# Altium footprint library USB_A.PcbLib: 1 footprints
Each footprint in its own frame and in the unit in brackets; x right, y up, seen from the top. Pads: shape width x height; smd on the part's side, far side on the other; paste and mask are expansions set on the pad; w line width, h text height; cw(c..) or ccw(c..) is an arc to the next point about the centre after c.
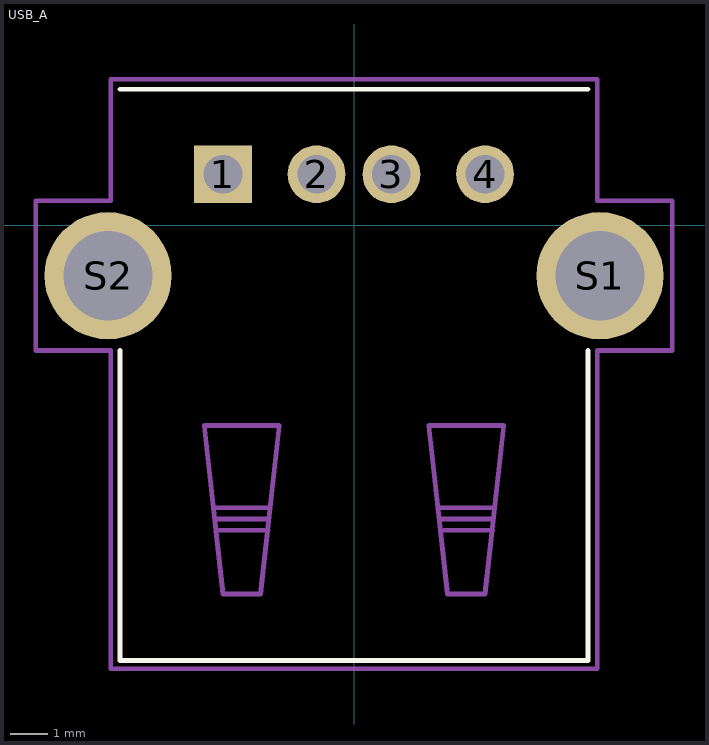
[diagram p0: the footprint, top view; thin cyan lines are the x and y axes]

## USB_A [mm] "MOLEX_67643-0910"
pads (6):
  rect 1.545x1.545 hole 1.03: 1(-3.5,1.355)
  round 1.545 hole 1.03: 2(-1,1.355) 3(1,1.355) 4(3.5,1.355)
  round 3.396 hole 2.38: S1(6.57,-1.355) S2(-6.57,-1.355)
Top Overlay:
  lines w0.127: -6.25,-3.355 -6.25,-11.635 6.25,-11.635 6.25,-3.355 ; -6.25,3.625 6.25,3.625
Mechanical 13:
  lines w0.127: -4,-5.355 -3.5,-9.855 ; -4,-5.355 -2,-5.355 ; -4,-5.355 -3.5,-9.855 ; -4,-5.355 -2,-5.355 ; -3.5,-9.855 -2.5,-9.855 ; -3.5,-9.855 -2.5,-9.855 ; -2.5,-9.855 -2,-5.355 ; -2.5,-9.855 -2,-5.355 ; 2,-5.355 2.5,-9.855 ; 2,-5.355 4,-5.355 ; 2,-5.355 2.5,-9.855 ; 2,-5.355 4,-5.355 ; 2.5,-9.855 3.5,-9.855 ; 2.5,-9.855 3.5,-9.855 ; 3.5,-9.855 4,-5.355 ; 3.5,-9.855 4,-5.355 ; -3.7,-7.855 -2.3,-7.855 -3.7,-7.855 ; -3.7,-7.555 -2.3,-7.555 -3.7,-7.555 ; -3.6,-8.155 -2.3,-8.155 -3.6,-8.155 ; -3.5,-7.855 -2.5,-7.855 -3.5,-7.855 ; 2.3,-7.855 3.7,-7.855 2.3,-7.855 ; 2.3,-7.555 3.7,-7.555 2.3,-7.555 ; 2.4,-8.155 3.7,-8.155 2.4,-8.155 ; 2.5,-7.855 3.5,-7.855 2.5,-7.855
Mechanical 15:
  lines w0.127: -8.5,-3.355 -6.5,-3.355 -6.5,-11.855 6.5,-11.855 6.5,-3.355 8.5,-3.355 8.5,0.645 6.5,0.645 6.5,3.895 -6.5,3.895 -6.5,0.645 -8.5,0.645 -8.5,-3.355
3D body "USB_A.stp": height 7.73, standoff -3.7, extent -7.997,-11.684 7.997,3.576